# EAGLE library part SN65HVD230-MODULE (library moto-core)
SN65HVD230-MODULE SN65HVD230 3.3V CAN transceiver karti (VP230). Kart uzerinde 120R olabilir (R2) - arac hattinda sok. Kart: 27.0 x 11.0 mm - Guven: M STEP: GrabCAD 'SN65HVD230 module'
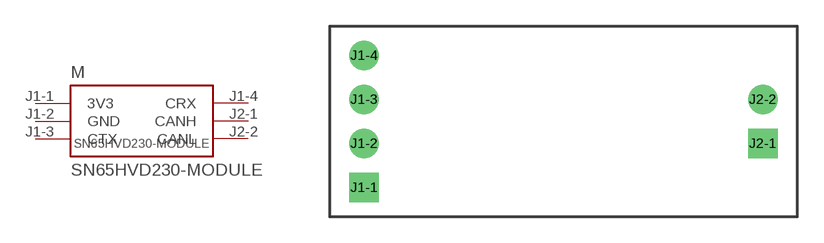
[diagram p2: symbol with the pads of SN65HVD230-MODULE; footprint SN65HVD230-MODULE]

Designator prefix M

## SN65HVD230-MODULE (BOARD_SIZE: 27.0x11.0mm; CONFIDENCE: M)  [SN65HVD230-MODULE]
J1-1  3V3  pas
J1-2  GND  pas
J1-3  CTX  pas
J1-4  CRX  pas
J2-1  CANH  pas
J2-2  CANL  pas

## Footprint SN65HVD230-MODULE (pad centres in mm)
SN65HVD230 3.3V CAN transceiver karti (VP230). Kart uzerinde 120R olabilir (R2) - arac hattinda sok. | Kart: 27.0 x 11.0 mm | Guven: M
drill 1 pad 1.7 square: J1-1 -11.5,-3.81; J2-1 11.5,-1.27
drill 1 pad 1.7 round: J1-2 -11.5,-1.27; J1-3 -11.5,1.27; J1-4 -11.5,3.81; J2-2 11.5,1.27